# Altium schematic symbol library BM04B-GHS-TBT.SchLib: 1 symbol
Pins are listed as number, name and electrical type; pins without a type are passive.

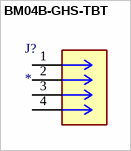
[diagram p0: symbol BM04B-GHS-TBT]

## BM04B-GHS-TBT
designator J?
Connector Header Surface Mount 4 position 0.049 (1.25mm); MF: JST Sales; MP: BM04B-GHS-TBT; SnapEDA_Link: https://www.snapeda.com/parts/BM04B-GHS-TBT/JST+Sales+America+Inc./view-part/?ref=snap; Package: None; Value: *; Check_prices: https://www.snapeda.com/parts/BM04B-GHS-TBT/JST+Sales+America+Inc./view-part/?ref=eda
footprint CONN_BM04B-GHS-TBT_JST
pins: 1, 2, 3, 4